# EAGLE library part IC_MCP4442 (library dp_devices.v6)
7/8-Bit Quad I2C digital POT with Nonvolatile memory
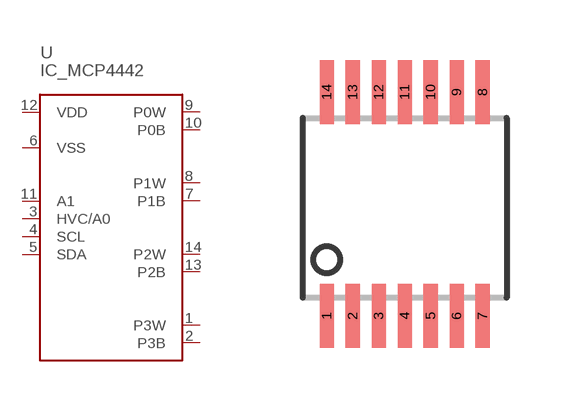
[diagram p206: symbol with the pads of TSSOP-14; footprint TSSOP-14]

Designator prefix U

## IC_MCP4442  [TSSOP-14]
1  P3W
2  P3B
3  HVC/A0  in
4  SCL  in
5  SDA
6  VSS  pwr
7  P1B
8  P1W
9  P0W
10  P0B
11  A1  in
12  VDD  pwr
13  P2B
14  P2W

## Footprint TSSOP-14 (pad centres in mm)
smd 0.35 x 1.6: 1 -1.95,-2.7; 2 -1.3,-2.7; 3 -0.65,-2.7; 4 0,-2.7; 5 0.65,-2.7; 6 1.3,-2.7; 7 1.95,-2.7; 8 1.95,2.9; 9 1.3,2.9; 10 0.65,2.9; 11 0,2.9; 12 -0.65,2.9; 13 -1.3,2.9; 14 -1.95,2.9